# EAGLE library part ALANS100X1-2F30DT (library ALANS100X1-2F30DT)
350H Pulse Transformer 1CT:1CT Surface Mount Source: Datasheet <https://www.digikey.ph/en/products/detail/abracon-llc/ALANS100X1-2F30DT/10257827>
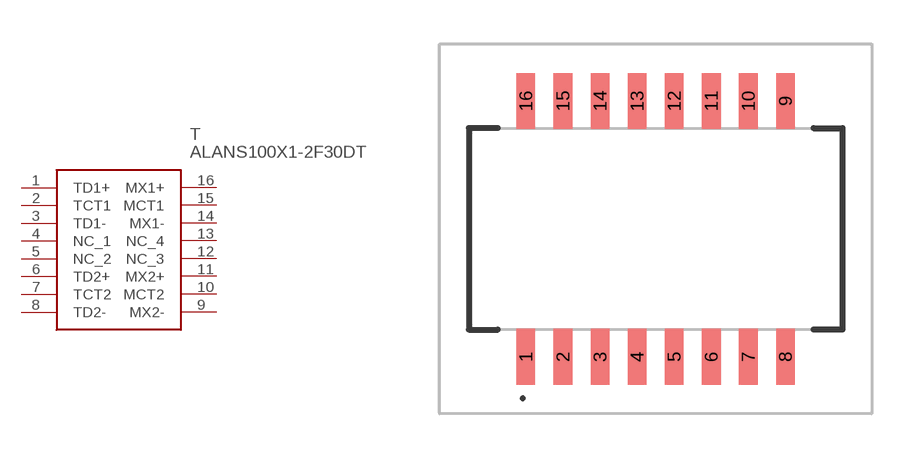
[diagram p0: symbol with the pads of ALANS100X12F30DT; footprint ALANS100X12F30DT]

Designator prefix T

## ALANS100X1-2F30DT (Description: 350H Pulse Transformer 1CT:1CT Surface Mount; Height: 5.9mm; Manufacturer_Name: ABRACON; Manufacturer_Part_Number: ALANS100X1-2F30DT; Mouser_Part_Number: 815-ALANS100X12F30DT; Mouser_Price-Stock: https://www.mouser.co.uk/ProductDetail/ABRACON/ALANS100X1-2F30DT?qs=mAH9sUMRCtuizu44xbH5Uw%3D%3D)  [ALANS100X12F30DT]
1  TD1+
2  TCT1
3  TD1-
4  NC_1
5  NC_2
6  TD2+
7  TCT2
8  TD2-
9  MX2-
10  MCT2
11  MX2+
12  NC_3
13  NC_4
14  MX1-
15  MCT1
16  MX1+

## Footprint ALANS100X12F30DT (pad centres in mm)
12.8 x 6.9 x 5.9 mm
smd 0.64 x 1.91: 1 -4.445,-4.38; 2 -3.175,-4.38; 3 -1.905,-4.38; 4 -0.635,-4.38; 5 0.635,-4.38; 6 1.905,-4.38; 7 3.175,-4.38; 8 4.445,-4.38; 9 4.445,4.38; 10 3.175,4.38; 11 1.905,4.38; 12 0.635,4.38; 13 -0.635,4.38; 14 -1.905,4.38; 15 -3.175,4.38; 16 -4.445,4.38